# Altium footprint library huan_basic.PcbLib: 138 footprints (part 2 of 9)
Each footprint in its own frame and in the unit in brackets; x right, y up, seen from the top. Pads: shape width x height; smd on the part's side, far side on the other; paste and mask are expansions set on the pad; w line width, h text height; cw(c..) or ccw(c..) is an arc to the next point about the centre after c.
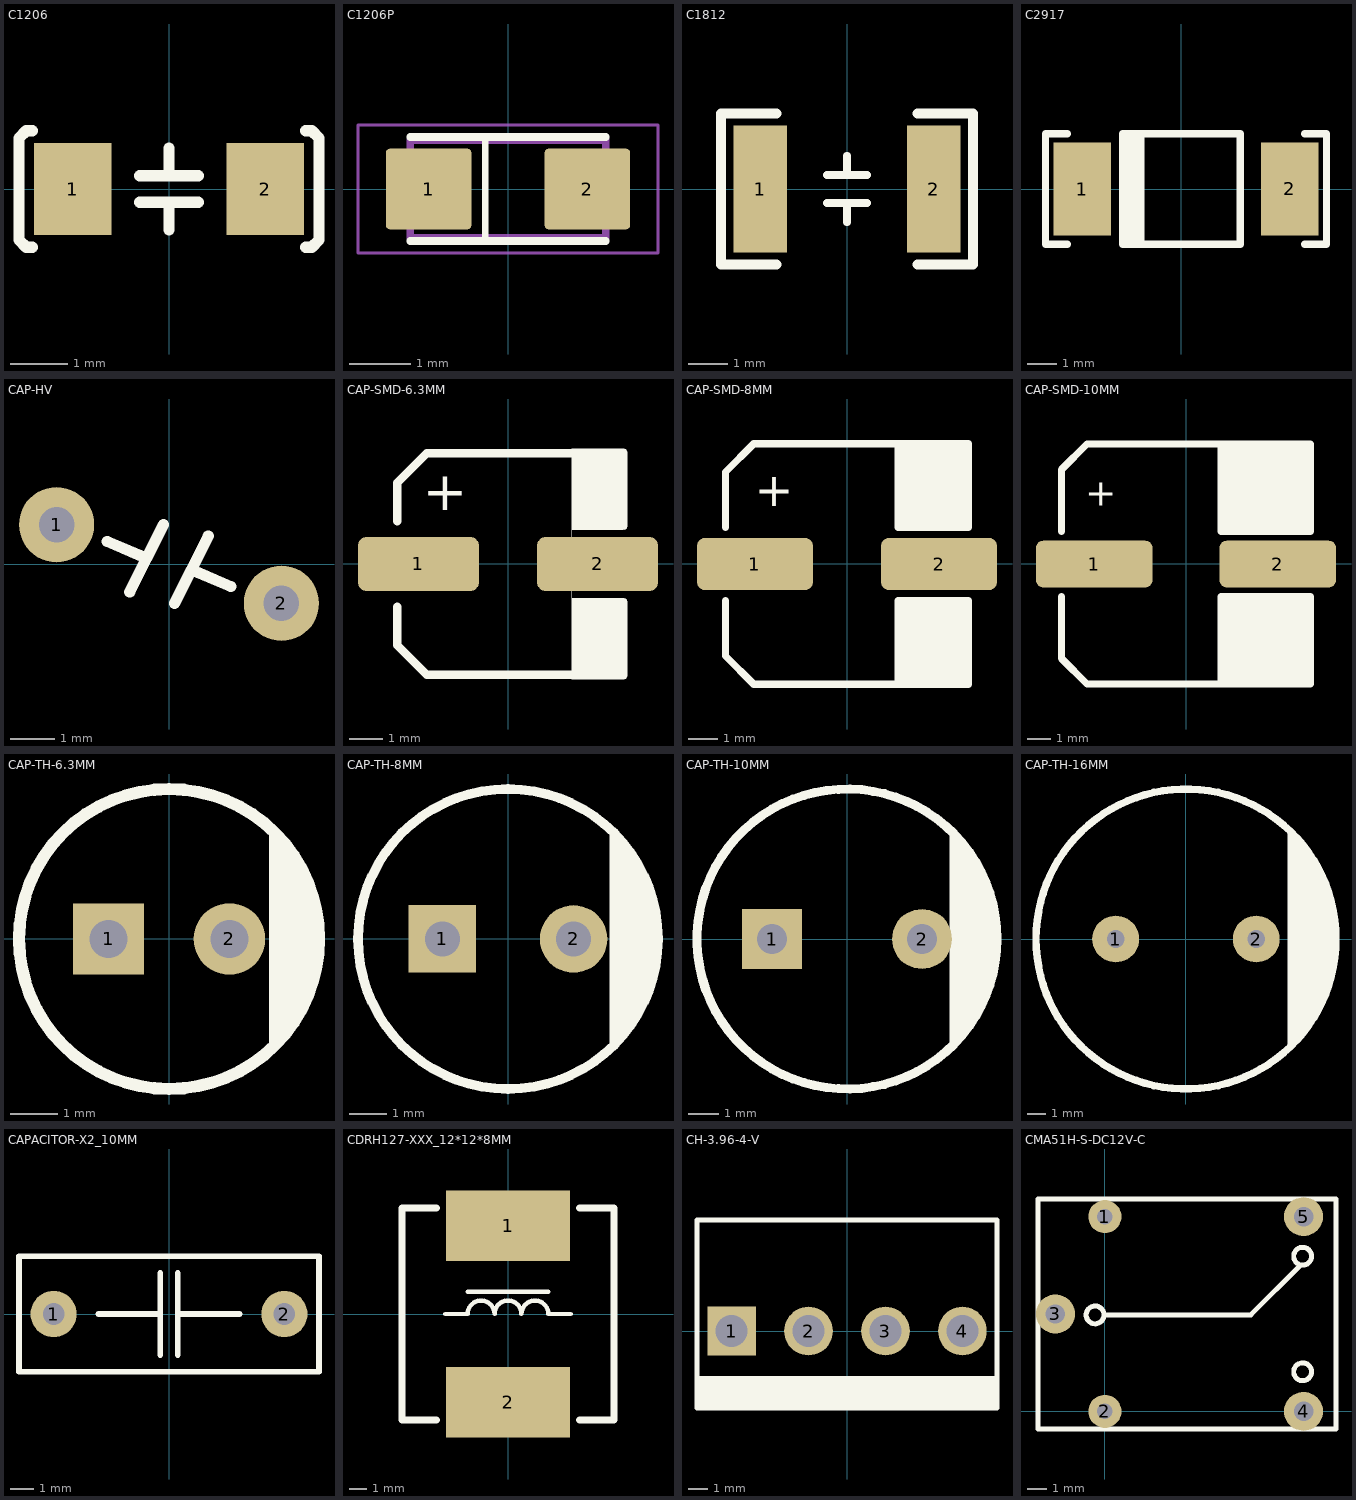
[diagram p1: the footprints below, top view; thin cyan lines are the x and y axes]

## C1206 [mm]
pads (2):
  rect 1.35x1.6 smd: 1(-1.676,0) 2(1.676,0)
Top Overlay:
  lines w0.2: -2.388,-1.016 -2.489,-1.016 -2.616,-0.889 -2.616,0.889 -2.489,1.016 -2.388,1.016 ; -0.508,-0.229 0.508,-0.229 ; -0.508,0.229 0.508,0.229 ; 0,-0.711 0,-0.229 ; 0,0.229 0,0.711 ; 2.388,-1.016 2.489,-1.016 2.616,-0.889 2.616,0.889 2.489,1.016 2.388,1.016
3D body "csmd-1206_l3-2_w1-6_h0-94.stp": height 0.94, standoff 0, extent -1.6,-0.8 1.6,0.8

## C1206P [mm]
height 1.8
pads (2):
  rrect10% 1.4x1.32 smd paste+0 mask+0.102: 1(-1.3,0) 2(1.3,0)
Top Overlay:
  lines w0.1: -0.373,-0.8 -0.373,-0.853 -0.373,0.853 -0.35,0.853
  lines w0.127: -1.6,-0.853 1.6,-0.853 ; -1.6,0.853 1.6,0.853
Mechanical 13:
  lines w0.127: -1.6,-0.8 1.6,-0.8 1.6,0.8 -1.6,0.8 -1.6,-0.8
Mechanical 15:
  lines w0.05: -2.455,-1.05 -2.455,1.05 2.455,1.05 2.455,-1.05 -2.455,-1.05
3D body "step_temp.STEP": height 1.8, standoff 0, extent -1.6,-0.8 1.6,0.8

## C1812 [mm]
pads (2):
  rect 1.35x3.2 smd: 1(-2.184,0) 2(2.184,0)
Top Overlay:
  lines w0.2: -0.508,-0.356 0.508,-0.356 ; -0.508,0.356 0.508,0.356 ; 0,-0.838 0,-0.356 ; 0,0.356 0,0.838
  lines w0.254: -1.778,-1.905 -3.175,-1.905 -3.175,1.905 -1.778,1.905 ; 1.778,-1.905 3.175,-1.905 3.175,1.905 1.778,1.905
3D body "C4532X7R2A225M230KA.step": height 2.5, standoff 0, extent -2.25,-1.6 2.25,1.6

## C2917 [mm]
pads (2):
  rect 2x3.2 smd: 1(-3.429,0) 2(3.746,0)
Top Overlay:
  rectangle: -2.032,-1.905 -1.27,1.905
  lines w0.254: -3.937,-1.905 -4.699,-1.905 -4.699,1.905 -3.937,1.905 ; 4.254,-1.905 5.016,-1.905 5.016,1.905 4.254,1.905 ; -2.032,-1.905 -2.032,1.905 2.032,1.905 2.032,-1.905 -2.032,-1.905
3D body "EEF-HE_PAN.step": height 4.34, standoff 0, extent -3.746,-2.248 3.746,2.248

## CAP-HV [mm]
pads (2):
  round 1.7 hole 0.8: 1(-2.54,0.889) 2(2.54,-0.889)
Top Overlay:
  lines w0.254: -1.397,0.508 -0.508,0.127 ; -0.889,-0.635 -0.508,0.127 ; -0.127,0.889 -0.508,0.127 ; 0.127,-0.889 0.508,-0.127 ; 0.889,0.635 0.508,-0.127 ; 1.397,-0.508 0.508,-0.127
3D body "disk capacitor.stp": height 10.75, standoff -3, extent -3.742,-1.926 3.743,1.926

## CAP-SMD-6.3MM [mm]
pads (2):
  rrect30% 3.6x1.6 smd: 1(-2.667,0) 2(2.667,0)
Top Overlay:
  region: 1.905,-3.43 1.905,3.429 3.429,3.429 3.454,3.429 3.501,3.41 3.537,3.374 3.556,3.327 3.556,3.302 3.556,1.143 3.556,1.118 3.537,1.071 3.501,1.035 3.454,1.016 3.429,1.016 1.905,1.016 1.905,-1.016 3.429,-1.016 3.454,-1.016 3.501,-1.035 3.537,-1.071 3.556,-1.118 3.556,-1.143 3.556,-3.302 3.556,-3.328 3.537,-3.374 3.501,-3.41 3.454,-3.43 3.429,-3.43
  lines w0.254: -3.302,-1.27 -3.302,-2.413 -2.413,-3.302 3.429,-3.302 ; -3.302,1.27 -3.302,2.413 -2.413,3.302 3.429,3.302 ; 0,-3.302 3.429,-3.302 ; 3.429,-3.302 3.429,-1.143 3.429,-3.302
  text "+" at -2.54,1.217 h2
3D body "CP_Elec_6.3x5.8.step": height 5.8, standoff 0, extent -3.9,-3.3 3.9,3.3

## CAP-SMD-8MM [mm]
pads (2):
  rrect30% 4x1.8 smd: 1(-3.175,0) 2(3.174,0)
Top Overlay:
  region: 1.769,1.27 4.191,1.27 4.191,4.15 1.769,4.15
  region: 1.769,-1.27 4.191,-1.27 4.191,-4.15 1.769,-4.15
  lines w0.254: -4.191,-1.27 -4.191,-3.175 -3.216,-4.15 4.191,-4.15 ; -4.191,1.27 -4.191,3.175 -3.216,4.15 4.191,4.15 ; 4.191,-4.15 4.191,-1.27 ; 4.191,-4.15 4.191,-1.27 ; 4.191,-4.15 1.769,-4.15 1.769,-1.27 4.191,-1.27 ; 4.191,1.27 4.191,4.15 ; 4.191,1.27 4.191,4.15 ; 4.191,1.27 1.769,1.27 1.769,4.15 4.191,4.15
  text "+" at -3.175,1.598 h2
3D body "CP_Elec_8x10.5.step": height 10.5, standoff 0, extent -4.75,-4.15 4.75,4.15

## CAP-SMD-10MM [mm]
pads (2):
  rrect30% 5x2 smd: 1(-3.937,0) 2(3.936,0)
Top Overlay:
  region: 1.508,-1.397 5.334,-1.397 5.334,-5.15 1.508,-5.15
  region: 1.508,1.397 5.334,1.397 5.334,5.15 1.508,5.15
  lines w0.254: 1.508,-5.15 5.334,-5.15 ; 1.508,5.15 5.334,5.15
  lines w0.3: -5.334,-1.397 -5.334,-4.064 -4.248,-5.15 5.334,-5.15 ; -5.334,1.397 -5.334,4.064 -4.248,5.15 5.334,5.15 5.334,1.397 1.508,1.397 1.508,5.15 ; 1.508,-5.15 1.508,-1.397 5.334,-1.397 ; 5.334,-5.15 5.334,-1.397 ; 5.334,-5.15 5.334,-1.397
  text "+" at -4.318,2.106 h2
3D body "CP_Elec_10x12.5.step": height 12.5, standoff 0, extent -6,-5.15 6,5.15

## CAP-TH-6.3MM [mm]
pads (2):
  rect 1.5x1.5 hole 0.8: 1(-1.27,0)
  round 1.5 hole 0.8: 2(1.269,0)
Top Overlay:
  circle w0.254: c0,0 r3.15
  region: 2.227,-2.228 2.227,2.228 2.373,2.081 2.625,1.754 2.831,1.396 2.989,1.015 3.096,0.616 3.15,0.206 3.15,-0.207 3.096,-0.616 2.989,-1.015 2.831,-1.396 2.625,-1.754 2.373,-2.082
  lines w0.254: 2.227,-2.228 ccw(c0,0) 2.227,2.228 2.227,-2.228
3D body "El_2.5_6.3_11.4.STEP": height 11.7, standoff -4.4, extent -3.15,-3.15 3.15,3.15

## CAP-TH-8MM [mm]
pads (2):
  rect 1.8x1.8 hole 0.94: 1(-1.75,0)
  round 1.8 hole 0.94: 2(1.75,0)
Top Overlay:
  circle w0.254: c0,0 r4
  region: 2.828,-2.828 3.014,-2.643 3.333,-2.227 3.595,-1.773 3.796,-1.289 3.932,-0.782 4,-0.262 4,0.262 3.932,0.782 3.796,1.289 3.595,1.773 3.333,2.227 3.014,2.643 2.828,2.828
  lines w0.254: 2.828,-2.828 ccw(c0,0) 2.828,2.828 2.828,-2.828
3D body "El_3.5_8_14.SLDPRT": height 14.1, standoff -4.75, extent -4,-4 4,4

## CAP-TH-10MM [mm]
pads (2):
  rect 2x2 hole 1: 1(-2.5,0)
  round 2 hole 1: 2(2.5,0)
Top Overlay:
  circle w0.3: c0,0 r5
  region: 3.536,-3.536 3.536,3.536 3.767,3.304 4.166,2.784 4.494,2.216 4.745,1.611 4.914,0.978 5,0.328 5,-0.328 4.914,-0.978 4.745,-1.611 4.494,-2.216 4.166,-2.784 3.767,-3.304
  lines w0.254: 3.536,-3.536 ccw(c0,0) 3.536,3.536 3.536,-3.536
3D body "El_5_10_17.STEP": height 4.25, standoff -17.5, extent -5,-5 5,5

## CAP-TH-16MM [mm]
pads (2):
  round 2.5 hole 0.94: 1(-3.75,0) 2(3.75,0)
Top Overlay:
  circle w0.4: c0,0 r8
  region: 5.535,-5.746 5.535,5.776 5.826,5.498 6.349,4.884 6.808,4.221 7.197,3.516 7.514,2.775 7.755,2.005 7.917,1.216 8,0.414 8.001,-0.392 7.921,-1.195 7.76,-1.985 7.522,-2.754 7.207,-3.497 6.819,-4.203 6.362,-4.867 5.84,-5.482 5.55,-5.762
  lines w0.254: 5.535,-5.746 5.535,5.776 cw(c0,0) 5.55,-5.762
3D body "El_7.5_16_26.STEP": height 26.2, standoff -4.5, extent -8,-8 8,8

## CAPACITOR-X2_10MM [mm]
pads (2):
  round 2 hole 0.94: 1(-5,0) 2(5,0)
Top Overlay:
  lines w0.254: -3.048,0 -0.381,0 ; -0.381,-1.778 -0.381,0 ; -0.381,1.778 -0.381,0 ; 0.381,-1.778 0.381,0 ; 0.381,1.778 0.381,0 ; 3.048,0 0.381,0 ; -6.5,-2.5 6.5,-2.5 6.5,2.5 -6.5,2.5 -6.5,-2.5
3D body "X2 Film Capacitor.STEP": height 11.05, standoff -4.95, extent -6.5,-2.5 6.5,2.5

## CDRH127-XXX_12*12*8MM [mm]
pads (2):
  rect 7x4 smd: 1(0,5) 2(0,-5)
Top Overlay:
  lines w0.254: -3.556,0 -2.286,0 cw(c-1.524,0) -0.762,0 cw(c0,0) 0.762,0 cw(c1.524,0) 2.286,0 3.556,0 ; -2.286,1.27 2.286,1.27
  lines w0.4: -4.064,-6 -6,-6 -6,6 -4.064,6 ; 4.064,-6 6,-6 6,6 4.064,6
3D body "User Library-DR127-1.step": height 8, standoff 0, extent -6.25,-6.25 6.25,6.25

## CH-3.96-4-V [mm]
pads (4):
  rect 2.5x2.5 hole 1.63: 1(-5.94,0)
  round 2.5 hole 1.63: 2(-1.98,0) 3(1.98,0) 4(5.94,0)
Top Overlay:
  rectangle: -7.718,-3.962 7.718,-2.306
  lines w0.254: -7.718,-3.962 7.718,-3.962 7.718,5.715 -7.718,5.715 -7.718,-3.962
3D body "JST - CH - Thru (V) - 4Pin - 3.96mm.stp": height 13.69, standoff -3.4, extent -7.718,-4.853 7.718,5.715

## CMA51H-S-DC12V-C [mm]
pads (5):
  round 1.7 hole 0.8: 1(0,10) 2(0,0)
  round 2 hole 1: 3(-2.54,5) 4(10.2,0) 5(10.2,10)
Top Overlay:
  circle w0.254: c10.153,2.032 r0.458
  circle w0.254: c10.153,7.968 r0.458
  circle w0.254: c-0.508,4.953 r0.458
  lines w0.254: -0.05,4.953 7.493,4.953 10.033,7.493 ; -3.434,-0.903 -3.434,10.896 11.866,10.896 11.866,-0.903 -3.434,-0.903
3D body "CMA51H-S_DC12V-C_20A.STEP": height 13.7, standoff -3.8, extent -3.434,-0.903 11.866,10.897